# Altium footprint library 7499010121A.PcbLib: 1 footprints
Each footprint in its own frame and in the unit in brackets; x right, y up, seen from the top. Pads: shape width x height; smd on the part's side, far side on the other; paste and mask are expansions set on the pad; w line width, h text height; cw(c..) or ccw(c..) is an arc to the next point about the centre after c.
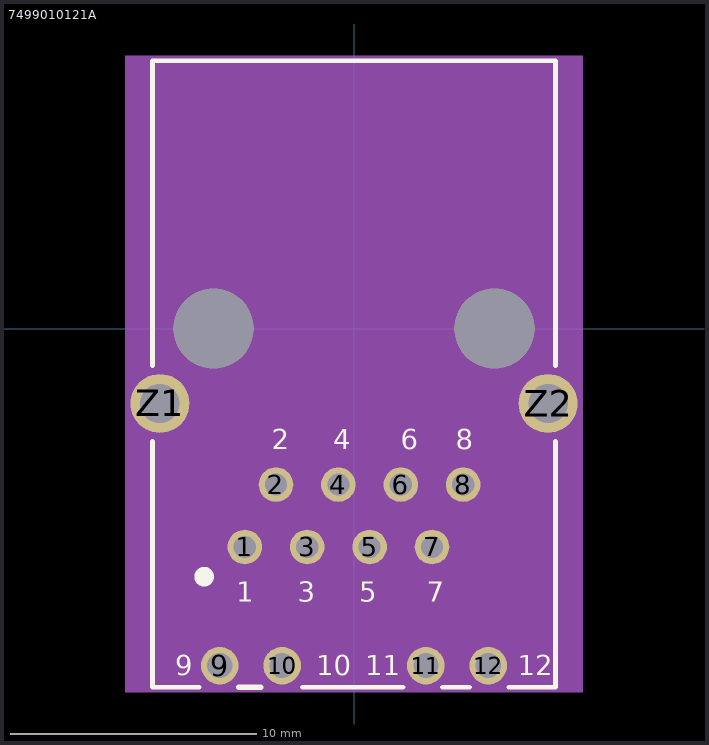
[diagram p0: the footprint, top view; thin cyan lines are the x and y axes]

## 7499010121A [mm]
pads (16):
  round 1.408 hole 0.9: 1(-4.445,-8.89) 2(-3.175,-6.35) 3(-1.905,-8.89) 4(-0.635,-6.35) 5(0.635,-8.89) 6(1.905,-6.35) 7(3.175,-8.89) 8(4.445,-6.35)
  round 1.53 hole 1.02: 9(-5.465,-13.72) 10(-2.925,-13.72) 11(2.925,-13.72) 12(5.465,-13.72)
  round 2.4 hole 1.6: Z1(-7.9,-3.05) Z2(7.9,-3.05)
  round 3.25 hole 3.25 unplated: ""(-5.715,0) ""(5.715,0)
Top Overlay:
  circle w0.4: c-6.1,-10.1 r0.2
  lines w0.2: -8.2,-4.6 -8.2,-14.6 -6.3,-14.6 ; -8.2,-1.5 -8.2,10.9 8.2,10.9 8.2,-1.5 ; -2.1,-14.6 2,-14.6 ; 3.6,-14.6 4.7,-14.6 ; 6.3,-14.6 8.2,-14.6 8.2,-4.6
  lines w0.22: -4.7,-14.6 -3.8,-14.6
  text "6" at 1.9,-4.92 h0.81
  text "4" at -0.85,-4.92 h0.81
  text "3" at -2.285,-11.11 h0.81
  text "5" at 0.215,-11.11 h0.81
  text "11" at 0.465,-14.11 h0.81
  text "10" at -1.535,-14.11 h0.81
  text "1" at -4.785,-11.11 h0.81
  text "7" at 2.965,-11.11 h0.81
  text "2" at -3.35,-4.92 h0.81
  text "8" at 4.15,-4.92 h0.81
  text "9" at -7.285,-14.11 h0.81
  text "12" at 6.665,-14.11 h0.81
Assembly Top:
  lines w0.1: -8.1,-14.5 8.1,-14.5 8.1,10.8 -8.1,10.8 -8.1,-14.5
Courtyard Top:
  region: 9.3,-14.8 -9.3,-14.8 -9.3,11.1 9.3,11.1